# Altium footprint library GY-BMI160.PcbLib: 1 footprints
Each footprint in its own frame and in the unit in brackets; x right, y up, seen from the top. Pads: shape width x height; smd on the part's side, far side on the other; paste and mask are expansions set on the pad; w line width, h text height; cw(c..) or ccw(c..) is an arc to the next point about the centre after c.
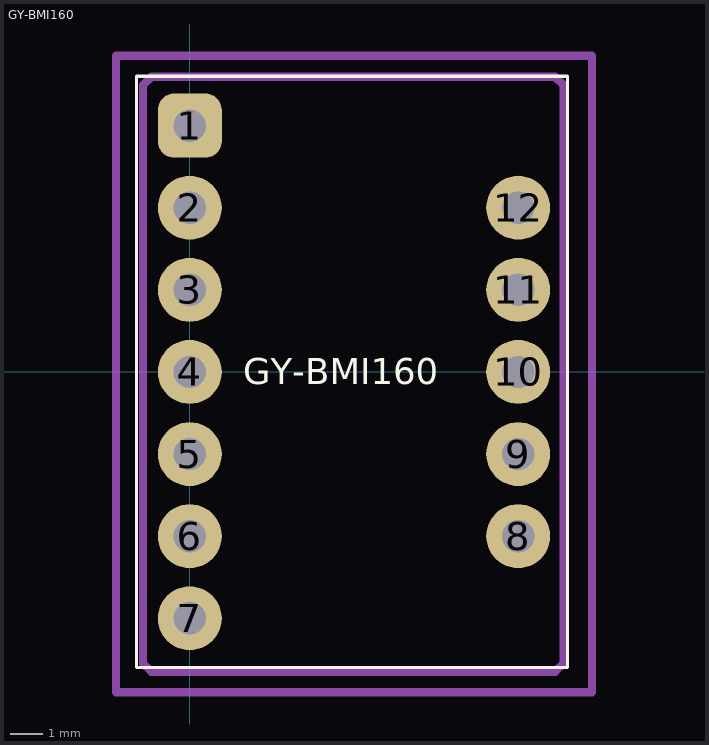
[diagram p0: the footprint, top view; thin cyan lines are the x and y axes]

## GY-BMI160 [mm] "IMU Module GY-BMI160"
pads (12):
  rrect50% 1.98x1.98 hole 1: 1(0,7.62)
  round 1.98 hole 1: 2(0,5.08) 3(0,2.54) 4(0,0) 5(0,-2.54) 6(0,-5.08) 7(0,-7.62) 8(10.16,-5.08) 9(10.16,-2.54) 10(10.16,0) 11(10.16,2.54) 12(10.16,5.08)
Top Overlay:
  lines w0.1: -1.651,-9.144 11.684,-9.144 11.684,9.144 -1.651,9.144 -1.651,-9.144
  text "GY-BMI160" at 1.651,-0.381 h0.8
Top Courtyard:
  lines w0.254: -2.286,-9.906 12.446,-9.906 12.446,9.779 -2.286,9.779 -2.286,-9.906
Bottom Courtyard:
  lines w0.254: -2.286,-9.906 12.446,-9.906 12.446,9.779 -2.286,9.779 -2.286,-9.906
Top Component Outline:
  lines w0.254: -1.443,-9.017 -1.189,-9.271 11.303,-9.271 11.557,-9.017 11.557,8.875 11.303,9.129 -1.189,9.129 -1.443,8.875 -1.443,-9.017
3D body "GY-BMI160.step": height 5.52, standoff -5.98, extent -1.42,-9.017 11.58,8.983